# Altium schematic symbol library SamacSys.SchLib: 20 symbols
Pins are listed as number, name and electrical type; pins without a type are passive.

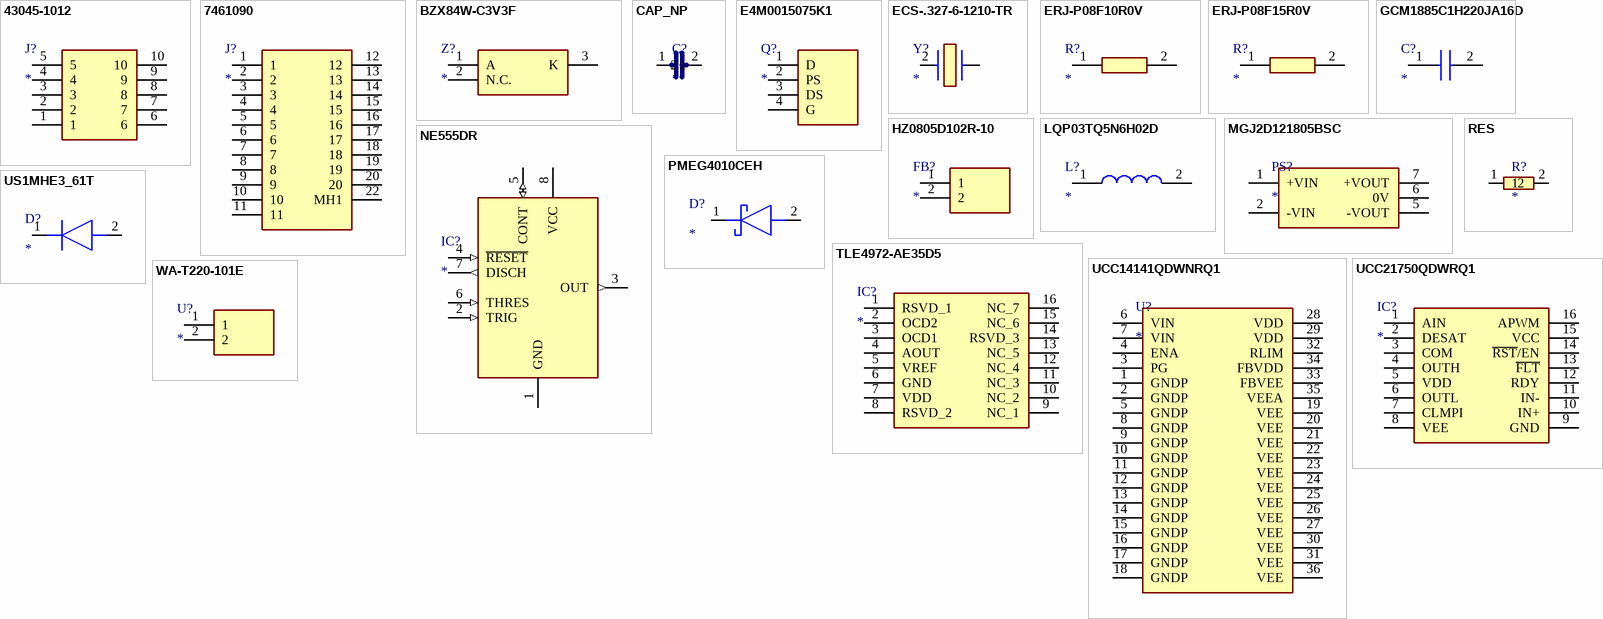
[diagram p0: symbols 43045-1012 to WA-T220-101E]

## 43045-1012
designator J?
Connector; Manufacturer_Name: Molex; Manufacturer_Part_Number: 43045-1012; Datasheet Link: https://www.molex.com/pdm_docs/sd/430450612_sd.pdf; Height: 9.91mm; Mouser Part Number: 538-43045-1012; Mouser Price/Stock: https://www.mouser.co.uk/ProductDetail/Molex/43045-1012?qs=KC2ywxza1koTZPAgAiHw3w%3D%3D
footprint 43045-10YY_121314
pins: 1, 2, 3, 4, 5, 6, 7, 8, 9, 10

## 7461090
designator J?
Connector; Manufacturer_Name: Wurth Elektronik; Manufacturer_Part_Number: 7461090; Datasheet Link: https://www.we-online.com/catalog/datasheet/7461090.pdf; Height: 13.5mm; Mouser Part Number: 710-7461090; Mouser Price/Stock: https://www.mouser.co.uk/ProductDetail/Wurth-Elektronik/7461090?qs=lykWx4dhCCGdDXRKZo1kEg%3D%3D
footprint 7461090
pins: 1, 2, 3, 4, 5, 6, 7, 8, 9, 10, 11, 12, 13, 14, 15, 16, 17, 18, 19, 20, 22 MH1

## BZX84W-C3V3F
designator Z?
Zener Diode; Manufacturer_Name: Nexperia; Manufacturer_Part_Number: BZX84W-C3V3F; Datasheet Link: https://assets.nexperia.com/documents/data-sheet/BZX84W_SER.pdf; Height: 1.1mm; Mouser Part Number: 771-BZX84W-C3V3F; Mouser Price/Stock: https://www.mouser.co.uk/ProductDetail/Nexperia/BZX84W-C3V3F?qs=MLItCLRbWsyTlmZP9y0kXg%3D%3D; Arrow Part Number: BZX84W-C3V3F; Arrow Price/Stock: https://www.arrow.com/en/products/bzx84w-c3v3f/nexperia.html?utm_currency=USD&region=europe
footprint SOT65P210X110-3N
pins: 1 A, 2 N.C., 3 K

## CAP_NP
designator C?
Capacitor, non-polarised
pins: 1, 2

## E4M0015075K1
designator Q?
MOSFET (N-Channel); Manufacturer_Name: Wolfspeed; Manufacturer_Part_Number: E4M0015075K1; Datasheet Link: https://assets.wolfspeed.com/uploads/2024/04/Wolfspeed_E4M0015075K1_data_sheet.pdf; Height: 21.14mm; Mouser Part Number: 941-E4M0015075K1; Mouser Price/Stock: https://www.mouser.co.uk/ProductDetail/Wolfspeed/E4M0015075K1?qs=dbcCsuKDzFXJMp4AtpeCVw%3D%3D; Arrow Part Number: E4M0015075K1; Arrow Price/Stock: https://www.arrow.com/en/products/e4m0015075k1/wolfspeed.html?utm_currency=USD&region=nac
footprint E4M0060075K1
pins: 1 D, 2 PS, 3 DS, 4 G

## ECS-.327-6-1210-TR
designator Y?
Crystal or Oscillator; Manufacturer_Name: ECS; Manufacturer_Part_Number: ECS-.327-6-1210-TR; Datasheet Link: https://www.mouser.mx/datasheet/2/122/ECX_1210-2400578.pdf; Height: 0.5mm; Mouser Part Number: 520-.327-6-1210-TR; Mouser Price/Stock: https://www.mouser.co.uk/ProductDetail/ECS/ECS-.327-6-1210-TR?qs=QNEnbhJQKvY40vrqytaXdA%3D%3D; Arrow Part Number: ECS-.327-6-1210-TR; Arrow Price/Stock: https://www.arrow.com/en/products/ecs-.327-6-1210-tr/ecs-international?region=nac
footprint ECS32761210TR
pins: 2 OUT/IN, ?1

## ERJ-P08F10R0V
designator R?
Resistor; Manufacturer_Name: Panasonic; Manufacturer_Part_Number: ERJ-P08F10R0V; Datasheet Link: http://industrial.panasonic.com/cdbs/www-data/pdf/RDO0000/AOA0000C331.pdf; Height: 0.7mm; Mouser Part Number: 667-ERJ-P08F10R0V; Mouser Price/Stock: https://www.mouser.co.uk/ProductDetail/Panasonic/ERJ-P08F10R0V?qs=iIVTEDlrHA2fc4Vdv4Btrw%3D%3D; Arrow Part Number: ERJ-P08F10R0V; Arrow Price/Stock: https://www.arrow.com/en/products/erj-p08f10r0v/panasonic?region=nac
footprint ERJP08_(1206)
pins: 1, 2

## ERJ-P08F15R0V
designator R?
Resistor; Manufacturer_Name: Panasonic; Manufacturer_Part_Number: ERJ-P08F15R0V; Datasheet Link: http://industrial.panasonic.com/cdbs/www-data/pdf/RDO0000/AOA0000C331.pdf; Height: 0.7mm; Mouser Part Number: 667-ERJ-P08F15R0V; Mouser Price/Stock: https://www.mouser.co.uk/ProductDetail/Panasonic/ERJ-P08F15R0V?qs=iIVTEDlrHA16GO8SZGWd2Q%3D%3D; Arrow Part Number: ERJ-P08F15R0V; Arrow Price/Stock: https://www.arrow.com/en/products/erjp08f15r0v/panasonic?utm_currency=USD&region=nac
footprint ERJP08_(1206)
pins: 1, 2

## GCM1885C1H220JA16D
designator C?
Capacitor; Manufacturer_Name: Murata Electronics; Manufacturer_Part_Number: GCM1885C1H220JA16D; Datasheet Link: https://search.murata.co.jp/Ceramy/image/img/A01X/G101/ENG/GCM1885C1H220JA16-01A.pdf; Height: 0.9mm; Mouser Part Number: 81-GCM1885C1H220J16D; Mouser Price/Stock: https://www.mouser.com/Search/Refine.aspx?Keyword=81-GCM1885C1H220J16D; Arrow Part Number: GCM1885C1H220JA16D; Arrow Price/Stock: https://www.arrow.com/en/products/gcm1885c1h220ja16d/murata-manufacturing?utm_currency=USD&region=europe
footprint CAPC1608X90N
pins: 1, 2

## HZ0805D102R-10
designator FB?
Ferrite Bead; Manufacturer_Name: Laird Technologies; Manufacturer_Part_Number: HZ0805D102R-10; Datasheet Link: https://assets.lairdtech.com/home/brandworld/files/HZ0805D102R-10.pdf; Height: 1.1mm; Mouser Part Number: N/A; Mouser Price/Stock: https://www.mouser.co.uk/ProductDetail/Laird/HZ0805D102R-10?qs=PzGy0jfpSMu99%252B2z15zRPA%3D%3D
footprint BEADC2012X110N
pins: 1, 2

## LQP03TQ5N6H02D
designator L?
Inductor; Manufacturer_Name: Murata Electronics; Manufacturer_Part_Number: LQP03TQ5N6H02D; Datasheet Link: https://search.murata.co.jp/Ceramy/image/img/P02/JELF243C-0024.pdf; Height: 0.32mm; Mouser Part Number: 81-LQP03TQ5N6H02D; Mouser Price/Stock: https://www.mouser.co.uk/ProductDetail/Murata-Electronics/LQP03TQ5N6H02D?qs=sEr9WmQGXZbbcy2w%252Bj2WxQ%3D%3D; Arrow Part Number: LQP03TQ5N6H02D; Arrow Price/Stock: https://www.arrow.com/en/products/lqp03tq5n6h02d/murata-manufacturing
footprint LQP03TQ0N6B02D
pins: 1, 2

## MGJ2D121805BSC
designator PS?
Murata MGJ2B isolated DC/DC 12 V in, +18 V / -5 V out, 2 W, 5.4 kV
footprint SIP7_MGJ2
pins: 1 +VIN, 2 -VIN, 5 -VOUT, 6 0V, 7 +VOUT

## NE555DR
designator IC?
Integrated Circuit; Manufacturer_Name: Texas Instruments; Manufacturer_Part_Number: NE555DR; Datasheet Link: http://www.ti.com/lit/ds/symlink/ne555.pdf; Height: 1.75mm; Mouser Part Number: 595-NE555DR; Mouser Price/Stock: https://www.mouser.com/Search/Refine.aspx?Keyword=595-NE555DR; RS Part Number: 1218414; RS Price/Stock: http://uk.rs-online.com/web/p/products/1218414
footprint SOIC127P600X175-8N
pins: 1 GND (power), 2 TRIG (in), 3 OUT (out), 4 ~{RESET} (in), 5 CONT (io), 6 THRES (in), 7 DISCH (out), 8 VCC (power)

## PMEG4010CEH
designator D?
Schottky Diode; Manufacturer_Name: Nexperia; Manufacturer_Part_Number: PMEG4010CEH; Datasheet Link: https://datasheet.datasheetarchive.com/originals/distributors/SFDatasheet-4/sf-00082344.pdf; Height: 1.2mm; Mouser Part Number: N/A; Mouser Price/Stock: https://www.mouser.co.uk/ProductDetail/Nexperia/PMEG4010CEH?qs=vHuUswq2%252BszYBzs3vH3ikw%3D%3D
footprint SOD3516X120N
pins: 1 K, 2 A

## RES
designator R?
Resistor
pins: 1, 2

## TLE4972-AE35D5
designator IC?
Integrated Circuit; Manufacturer_Name: Infineon; Manufacturer_Part_Number: TLE4972-AE35D5; Datasheet Link: https://www.infineon.com/dgdl/Infineon-TLE4972-AE35D5-DataSheet-v01_02-EN.pdf?fileId=8ac78c8c7c72fb9a017c7e1109e20a17; Height: 1.2mm
footprint SOP65P600X120-16N
pins: 1 RSVD_1, 2 OCD2, 3 OCD1, 4 AOUT, 5 VREF, 6 GND, 7 VDD, 8 RSVD_2, 9 NC_1, 10 NC_2, 11 NC_3, 12 NC_4, 13 NC_5, 14 RSVD_3, 15 NC_6, 16 NC_7

## UCC14141QDWNRQ1
designator U?
1.5 W isolated bias supply, 12 V in, adjustable VDD-VEE / COM-VEE
footprint SSOP36_DWN
pins: 1 GNDP, 2 GNDP, 3 PG, 4 ENA, 5 GNDP, 6 VIN, 7 VIN, 8 GNDP, 9 GNDP, 10 GNDP, 11 GNDP, 12 GNDP, 13 GNDP, 14 GNDP, 15 GNDP, 16 GNDP, 17 GNDP, 18 GNDP, 19 VEE, 20 VEE, 21 VEE, 22 VEE, 23 VEE, 24 VEE, 25 VEE, 26 VEE, 27 VEE, 28 VDD, 29 VDD, 30 VEE, 31 VEE, 32 RLIM, 33 FBVEE, 34 FBVDD, 35 VEEA, 36 VEE

## UCC21750QDWRQ1
designator IC?
Integrated Circuit; Manufacturer_Name: Texas Instruments; Manufacturer_Part_Number: UCC21750QDWRQ1; Datasheet Link: https://www.ti.com/lit/gpn/UCC21750-Q1; Height: 2.65mm; Mouser Part Number: 595-UCC21750QDWRQ1; Mouser Price/Stock: https://www.mouser.co.uk/ProductDetail/Texas-Instruments/UCC21750QDWRQ1?qs=BJlw7L4Cy7%2FADnnEzoLd5w%3D%3D; Arrow Part Number: UCC21750QDWRQ1; Arrow Price/Stock: https://www.arrow.com/en/products/ucc21750qdwrq1/texas-instruments.html?utm_currency=USD&region=nac
footprint SOIC127P1030X265-16N
pins: 1 AIN, 2 DESAT, 3 COM, 4 OUTH, 5 VDD, 6 OUTL, 7 CLMPI, 8 VEE, 9 GND, 10 IN+, 11 IN-, 12 RDY, 13 ~{FLT}, 14 ~{RST}/EN, 15 VCC, 16 APWM

## US1MHE3_61T
designator D?
Diode; Manufacturer_Name: Vishay; Manufacturer_Part_Number: US1MHE3/61T; Datasheet Link: https://www.vishay.com/docs/88768/us1_test_dcicons.pdf; Height: 2.29mm; Mouser Part Number: 625-US1MHE3; Mouser Price/Stock: https://www.mouser.co.uk/ProductDetail/Vishay-Semiconductors/US1MHE3-61T?qs=D6r9GjgEnNNyhtP47Emw%252Bg%3D%3D
footprint DIOM5127X229N
pins: 1 K, 2 A

## WA-T220-101E
designator U?
Undefined or Miscellaneous; Manufacturer_Name: Ohmite; Manufacturer_Part_Number: WA-T220-101E; Datasheet Link: https://www.ohmite.com/assets/docs/sink_w.pdf?r=false; Height: 32.3mm; Mouser Part Number: 588-WA-T220-101E; Mouser Price/Stock: https://www.mouser.co.uk/ProductDetail/Ohmite/WA-T220-101E?qs=TVIBDWOgMcXN3XlHAuYPZQ%3D%3D
footprint WAT220101E
pins: 1, 2